# Altium schematic symbol library LTC5594IUHPBF.SchLib: 1 symbol
Pins are listed as number, name and electrical type; pins without a type are passive.

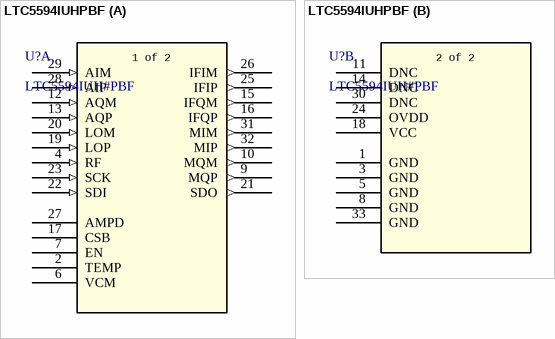
[diagram p0: symbol LTC5594IUHPBF]

## LTC5594IUHPBF
designator U?, comment LTC5594IUH#PBF
300MHz to 9GHz High Linearity I/Q Demodulator with Wideband IF Amplifier; Manufacturer_Name: Analog Devices Inc; Copyright: Copyright (C) 2026 Ultra Librarian. All rights reserved.; Manufacturer_Part_Number: LTC5594IUH#PBF; RefDes: RefDes; Type: Type
footprint UH_05-08-1693_ADI
part A pins: 2 TEMP, 4 RF (in), 6 VCM, 7 EN, 9 MQP (out), 10 MQM (out), 12 AQM (in), 13 AQP (in), 15 IFQM (out), 16 IFQP (out), 17 CSB, 19 LOP (in), 20 LOM (in), 21 SDO (out), 22 SDI (in), 23 SCK (in), 25 IFIP (out), 26 IFIM (out), 27 AMPD, 28 AIP (in), 29 AIM (in), 31 MIM (out), 32 MIP (out)
part B pins: 1 GND (power), 3 GND (power), 5 GND (power), 8 GND (power), 11 DNC, 14 DNC, 18 VCC (power), 24 OVDD (power), 30 DNC, 33 GND (power)
part A text: 1 of 2
part B text: 2 of 2